# Altium footprint library SamacSys.PcbLib: 1008 footprints (part 30 of 63)
Each footprint in its own frame and in the unit in brackets; x right, y up, seen from the top. Pads: shape width x height; smd on the part's side, far side on the other; paste and mask are expansions set on the pad; w line width, h text height; cw(c..) or ccw(c..) is an arc to the next point about the centre after c.
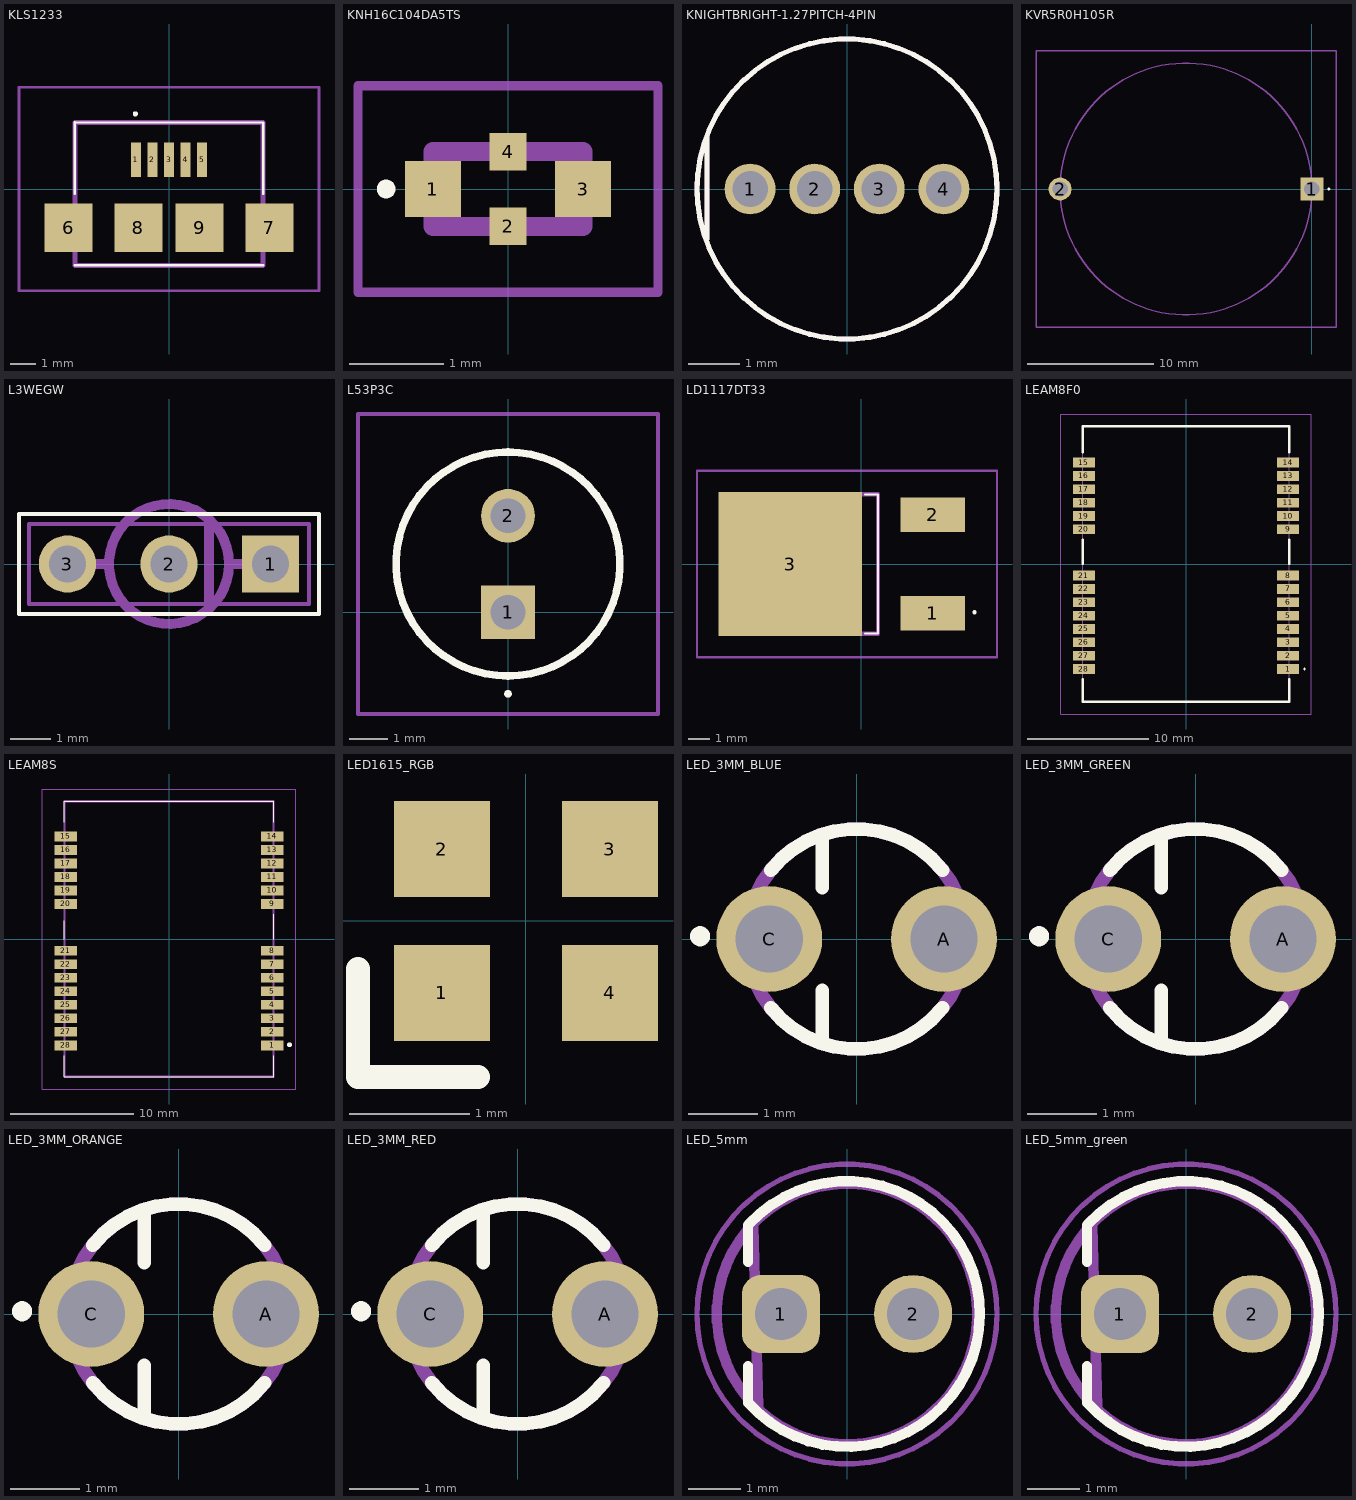
[diagram p29: the footprints below, top view; thin cyan lines are the x and y axes]

## KLS1233 [mm]
pads (9):
  rect 0.4x1.35 smd: 1(-1.3,1.145) 2(-0.65,1.145) 3(0,1.145) 4(0.65,1.145) 5(1.3,1.145)
  rect 1.9x1.9 smd: 6(-3.95,-1.53) 7(3.95,-1.53) 8(-1.2,-1.53) 9(1.2,-1.53)
Top Overlay:
  lines w0.1: -3.7,-2.993 3.7,-2.993 ; -3.7,-0.193 -3.7,2.622 3.7,2.607 3.7,-0.193 ; -1.324,2.907 ccw(c-1.324,2.957) -1.324,3.008 ccw(c-1.324,2.957) -1.324,2.907
Assembly:
  lines w0.2: -3.7,-3.008 -3.7,2.622 3.7,2.622 3.7,-3.008 -3.7,-3.008
Countryard:
  lines w0.1: -5.9,-4.008 -5.9,4.008 5.9,4.008 5.9,-4.008 -5.9,-4.008
3D body "KLS1-233.stp": height 2.1, standoff 0, extent -3.7,-3.008 3.7,2.622

## KNH16C104DA5TS [mm]
pads (4):
  rect 0.6x0.6 smd: 1(-0.8,0) 3(0.8,0)
  rect 0.4x0.4 smd: 2(0,-0.4) 4(0,0.4)
Top Overlay:
  lines w0.1: -1.3,-0.05 ccw(c-1.3,0) -1.3,0.05 ccw(c-1.3,0) -1.3,-0.05
Assembly:
  lines w0.2: -0.8,-0.4 -0.8,0.4 0.8,0.4 0.8,-0.4 -0.8,-0.4
Countryard:
  lines w0.1: -1.6,-1.1 -1.6,1.1 1.6,1.1 1.6,-1.1 -1.6,-1.1
3D body "KNH16C104DA5TS.stp": height 0.65, standoff 0.05, extent -0.8,-0.4 0.8,0.4

## KNIGHTBRIGHT-1.27PITCH-4PIN [mm]
pads (4):
  round 1 hole 0.7 unplated: 1(-1.905,0) 2(-0.635,0) 3(0.635,0) 4(1.905,0)
Top Overlay:
  circle w0.1: c0,0 r2.95
  lines w0.1: -2.755,-0.981 -2.755,1.005
Assembly:
  circle w0.1: c0,0 r2.95
  lines w0.1: -2.755,-0.981 -2.755,1.005
3D body "L-154A4SURKQBDZGW.stp": height 16.6, standoff -16.5, extent -2.95,-2.95 2.5,2.95

## KVR5R0H105R [mm]
pads (2):
  rect 1.83x1.83 hole 1.22: 1(0,0)
  round 1.83 hole 1.22: 2(-20,0)
Top Overlay:
  lines w0.1: 1.3,0 ccw(c1.35,0) 1.4,0 ccw(c1.35,0) 1.3,0
Assembly:
  lines w0.1: -20,0 cw(c-10,0) 0,0 cw(c-10,0) -20,0
Countryard:
  lines w0.1: -21.915,-11 -21.915,11 1.915,11 1.915,-11 -21.915,-11
3D body "KVR-5R0H105-R.stp": height 6.58, standoff -3.92, extent -20.121,-9.088 0.085,9.888

## L3WEGW [mm] "LED 3MM, BI-COLOR"
pads (3):
  rect 1.431x1.431 hole 0.92: 1(2.54,0)
  round 1.431 hole 0.92: 2(0,0) 3(-2.54,0)
Top Overlay:
  lines w0.1: -3.75,-1.25 3.75,-1.25 3.75,1.25 -3.75,1.25 -3.75,-1.25
Top Assembly:
  circle w0.25: c0,0 r1.5
  lines w0.25: -2.54,0 -1.5,0 ; 1,-1 1,1 ; 1.5,0 2.54,0
Top Courtyard:
  lines w0.1: -3.5,-1 3.5,-1 3.5,1 -3.5,1 -3.5,-1
3D body "Bi-Color LED - Common Cathode v3.step": height 24.3, standoff -9.5, extent -2.79,-1.986 2.75,1.786

## L53P3C [mm]
pads (2):
  rect 1.416x1.416 hole 0.91: 1(0,0)
  round 1.416 hole 0.91: 2(0,2.54)
Top Overlay:
  lines w0.1: 0,-2.2 ccw(c0,-2.15) 0,-2.1 ccw(c0,-2.15) 0,-2.2
  lines w0.2: 0,-1.68 cw(c0,1.27) 0,4.22 cw(c0,1.27) 0,-1.68
Assembly:
  lines w0.1: 0,-1.68 cw(c0,1.27) 0,4.22 cw(c0,1.27) 0,-1.68
Countryard:
  lines w0.1: -3.95,-2.68 -3.95,5.22 3.95,5.22 3.95,-2.68 -3.95,-2.68
3D body "L-53P3C.stp": height 9.95, standoff -5, extent -2.95,-1.68 2.95,4.22

## LD1117DT33 [mm]
pads (3):
  rect 3x1.6 smd: 1(3.325,-2.3) 2(3.325,2.3)
  rect 6.7x6.7 smd: 3(-3.325,0)
Top Overlay:
  lines w0.1: 0.175,-3.25 0.775,-3.25 0.775,3.25 0.175,3.25 ; 5.275,-2.3 ccw(c5.275,-2.25) 5.275,-2.2 ccw(c5.275,-2.25) 5.275,-2.3
Assembly:
  lines w0.2: -5.325,-3.25 0.775,-3.25 0.775,3.25 -5.325,3.25 -5.325,-3.25
Countryard:
  lines w0.1: -7.675,-4.35 6.325,-4.35 6.325,4.35 -7.675,4.35 -7.675,-4.35
3D body "LF33CDT-TRY.stp": height 2.4, standoff 0, extent -5.98,-3.3 3.82,3.3

## LEAM8F0 [mm]
pads (28):
  rect 1.8x0.8 smd: 1(8.4,-8.65) 2(8.4,-7.55) 3(8.4,-6.45) 4(8.4,-5.35) 5(8.4,-4.25) 6(8.4,-3.15) 7(8.4,-2.05) 8(8.4,-0.95) 9(8.4,2.85) 10(8.4,3.95) 11(8.4,5.05) 12(8.4,6.15) 13(8.4,7.25) 14(8.4,8.35) 15(-8.4,8.35) 16(-8.4,7.25) 17(-8.4,6.15) 18(-8.4,5.05) 19(-8.4,3.95) 20(-8.4,2.85) 21(-8.4,-0.95) 22(-8.4,-2.05) 23(-8.4,-3.15) 24(-8.4,-4.25) 25(-8.4,-5.35) 26(-8.4,-6.45) 27(-8.4,-7.55) 28(-8.4,-8.65)
Top Overlay:
  lines w0.1: 9.7,-8.65 ccw(c9.75,-8.65) 9.8,-8.65 ccw(c9.75,-8.65) 9.7,-8.65
  lines w0.2: -8.5,-9.5 -8.5,-11.35 8.5,-11.35 8.5,-9.5 ; -8.5,0 -8.5,2 ; -8.5,9.2 -8.5,11.35 8.5,11.35 8.5,9.2 ; 8.5,0 8.5,2
Assembly:
  lines w0.1: -8.5,-11.35 -8.5,11.35 8.5,11.35 8.5,-11.35 -8.5,-11.35
Countryard:
  lines w0.1: -10.3,-12.35 -10.3,12.35 10.3,12.35 10.3,-12.35 -10.3,-12.35
3D body "LEA-M8F-0.stp": height 3.4, standoff 0, extent -8.5,-11.2 8.5,11.2

## LEAM8S [mm]
pads (28):
  rect 1.8x0.8 smd: 1(8.4,-8.65) 2(8.4,-7.55) 3(8.4,-6.45) 4(8.4,-5.35) 5(8.4,-4.25) 6(8.4,-3.15) 7(8.4,-2.05) 8(8.4,-0.95) 9(8.4,2.85) 10(8.4,3.95) 11(8.4,5.05) 12(8.4,6.15) 13(8.4,7.25) 14(8.4,8.35) 15(-8.4,8.35) 16(-8.4,7.25) 17(-8.4,6.15) 18(-8.4,5.05) 19(-8.4,3.95) 20(-8.4,2.85) 21(-8.4,-0.95) 22(-8.4,-2.05) 23(-8.4,-3.15) 24(-8.4,-4.25) 25(-8.4,-5.35) 26(-8.4,-6.45) 27(-8.4,-7.55) 28(-8.4,-8.65)
Top Overlay:
  lines w0.1: -8.5,-9.5 -8.5,-11.2 8.5,-11.2 8.5,-9.5 ; -8.5,0 -8.5,1.5 ; -8.5,9.5 -8.5,11.2 8.5,11.2 8.5,9.5 ; 8.5,0 8.5,2
  lines w0.2: 9.7,-8.6 cw(c9.8,-8.6) 9.9,-8.6 cw(c9.8,-8.6) 9.7,-8.6
Assembly:
  lines w0.2: -8.5,-11.2 -8.5,11.2 8.5,11.2 8.5,-11.2 -8.5,-11.2
Countryard:
  lines w0.1: -10.3,-12.2 -10.3,12.2 10.3,12.2 10.3,-12.2 -10.3,-12.2
3D body "LEA-M8S.stp": height 2.8, standoff 0, extent -8.5,-11.2 8.5,11.2

## LED1615_RGB [mm]
pads (4):
  rect 0.8x0.8 smd: 1(-0.7,-0.6) 2(-0.7,0.6) 3(0.7,0.6) 4(0.7,-0.6)
Top Overlay:
  lines w0.2: -1.4,-0.4 -1.4,-1.3 -0.4,-1.3

## LED_3MM_BLUE [mm]
pads (2):
  round 1.54 hole 0.98: A(1.27,0) C(-1.27,0)
Top Overlay:
  circle w0.2: c-2.274,0.04 r0.046
  lines w0.2: -1.249,-1 ccw(c0,0) 1.249,-1 ; -1.249,1 cw(c0,0) 1.249,1 ; -0.5,-1.5 -0.5,-0.75 ; -0.5,0.75 -0.5,1.5
Assembly:
  circle w0.2: c0,0 r1.6
3D body "LED 3mm BLEU.STEP": height 16.5, standoff -14, extent -1.6,-1.599 1.6,1.599

## LED_3MM_GREEN [mm]
pads (2):
  round 1.54 hole 0.98: A(1.27,0) C(-1.27,0)
Top Overlay:
  circle w0.2: c-2.274,0.04 r0.046
  lines w0.2: -1.249,-1 ccw(c0,0) 1.249,-1 ; -1.249,1 cw(c0,0) 1.249,1 ; -0.5,-1.5 -0.5,-0.75 ; -0.5,0.75 -0.5,1.5
Assembly:
  circle w0.2: c0,0 r1.6
3D body "LED 3mm GREEN.STEP": height 16.5, standoff -14, extent -1.6,-1.599 1.6,1.599

## LED_3MM_ORANGE [mm]
pads (2):
  round 1.54 hole 0.98: A(1.27,0) C(-1.27,0)
Top Overlay:
  circle w0.2: c-2.274,0.04 r0.046
  lines w0.2: -1.249,-1 ccw(c0,0) 1.249,-1 ; -1.249,1 cw(c0,0) 1.249,1 ; -0.5,-1.5 -0.5,-0.75 ; -0.5,0.75 -0.5,1.5
Assembly:
  circle w0.2: c0,0 r1.6
3D body "LED 3mm ORANGE.STEP": height 16.5, standoff -14, extent -1.6,-1.599 1.6,1.599

## LED_3MM_RED [mm]
pads (2):
  round 1.54 hole 0.98: A(1.27,0) C(-1.27,0)
Top Overlay:
  circle w0.2: c-2.274,0.04 r0.046
  lines w0.2: -1.249,-1 ccw(c0,0) 1.249,-1 ; -1.249,1 cw(c0,0) 1.249,1 ; -0.5,-1.5 -0.5,-0.75 ; -0.5,0.75 -0.5,1.5
Assembly:
  circle w0.2: c0,0 r1.6
3D body "LED 3mm RED.STEP": height 16.5, standoff -14, extent -1.6,-1.599 1.6,1.599

## LED_5mm [mm]
pads (2):
  rrect50% 1.5x1.5 hole 1: 1(-1.27,0)
  round 1.5 hole 1: 2(1.27,0)
Top Overlay:
  lines w0.2: -1.9,-1 -1.9,-1.7 ccw(c0,0) -1.873,1.729 ; -1.9,1 -1.9,1.7
Assembly:
  circle w0.2: c0,0 r2.5
  lines w0.2: -1.8,1.7 -1.7,-1.8
Countryard:
  circle w0.1: c0,0 r2.879

## LED_5mm_green [mm]
pads (2):
  rrect50% 1.5x1.5 hole 1: 1(-1.27,0)
  round 1.5 hole 1: 2(1.27,0)
Top Overlay:
  lines w0.2: -1.9,-1 -1.9,-1.7 ccw(c0,0) -1.873,1.729 ; -1.9,1 -1.9,1.7
Assembly:
  circle w0.2: c0,0 r2.5
  lines w0.2: -1.8,1.7 -1.7,-1.8
Countryard:
  circle w0.1: c0,0 r2.879
3D body "LED D5 - Green.step": height 19.6, standoff -15.4, extent -2.5,-2.944 2.95,2.944